# Altium schematic symbol library NCP360SNT1G.SchLib: 1 symbol
Pins are listed as number, name and electrical type; pins without a type are passive.

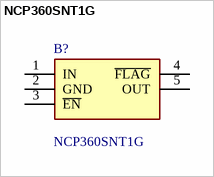
[diagram p0: symbol NCP360SNT1G]

## NCP360SNT1G
designator B?
These are Pb-Free Devices; Very Fast Protection, Up to 20 V, with 25 A Current Consumption; On-chip PMOS Transistor; Overvoltage Lockout (OVLO); Undervoltage Lockout (UVLO); Alert FLAG Output; EN Enable Pin; Thermal Shutdown; 6-Lead UDFN 2 x 2 mm Package; TSOP-5 3 x 3 mm Package; Personal Digital Applications; MP3 Players; Computing; Manufacturer_Name: onsemi; Geometry.Height: 1.1mm; Mouser Part Number: 863-NCP360SNT1G; Mouser Price/Stock: https://www.mouser.co.uk/ProductDetail/onsemi/NCP360SNT1G?qs=VZGfJwuufXYrtJO9gU8MlQ%3D%3D; Manufacturer_Part_Number: NCP360SNT1G; Datasheet Link: https://www.onsemi.com/pub/Collateral/NCP360-D.PDF
footprint SOT95P275X110-5N
pins: 1 IN, 2 GND, 3 ~{EN}, 4 ~{FLAG}, 5 OUT